# Altium footprint library 750319690.PcbLib: 1 footprints
Each footprint in its own frame and in the unit in brackets; x right, y up, seen from the top. Pads: shape width x height; smd on the part's side, far side on the other; paste and mask are expansions set on the pad; w line width, h text height; cw(c..) or ccw(c..) is an arc to the next point about the centre after c.
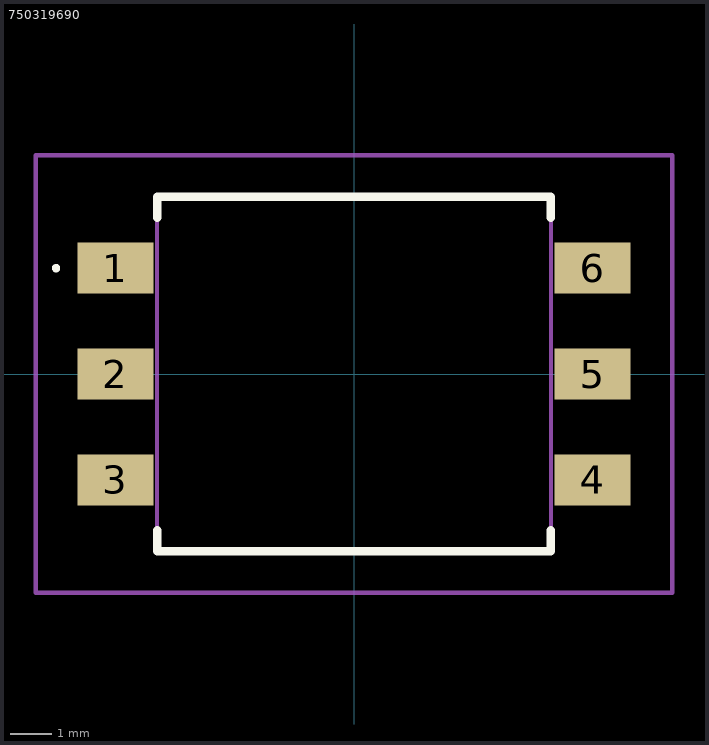
[diagram p0: the footprint, top view; thin cyan lines are the x and y axes]

## 750319690 [mm]
pads (6):
  rect 1.82x1.22 smd: 1(-5.725,2.54) 2(-5.725,0) 3(-5.725,-2.54) 4(5.725,-2.54) 5(5.725,0) 6(5.725,2.54)
Top Overlay:
  lines w0.1: -7.2,2.54 cw(c-7.15,2.54) -7.1,2.54 ; -7.2,2.54 -7.2,2.54 ; -7.2,2.54 ccw(c-7.15,2.54) -7.1,2.54 ; -7.1,2.54 -7.1,2.54
  lines w0.2: -4.725,-3.75 -4.725,-4.25 4.725,-4.25 4.725,-3.75 ; -4.725,3.75 -4.725,4.25 4.725,4.25 4.725,3.75
Mechanical 15:
  lines w0.1: -4.725,-4.25 4.725,-4.25 4.725,4.25 -4.725,4.25 -4.725,-4.25
Mechanical 20:
  lines w0.1: -7.635,-5.25 7.635,-5.25 7.635,5.25 -7.635,5.25 -7.635,-5.25